# Altium footprint library Footprints.PcbLib: 320 footprints (part 5 of 20)
Each footprint in its own frame and in the unit in brackets; x right, y up, seen from the top. Pads: shape width x height; smd on the part's side, far side on the other; paste and mask are expansions set on the pad; w line width, h text height; cw(c..) or ccw(c..) is an arc to the next point about the centre after c.
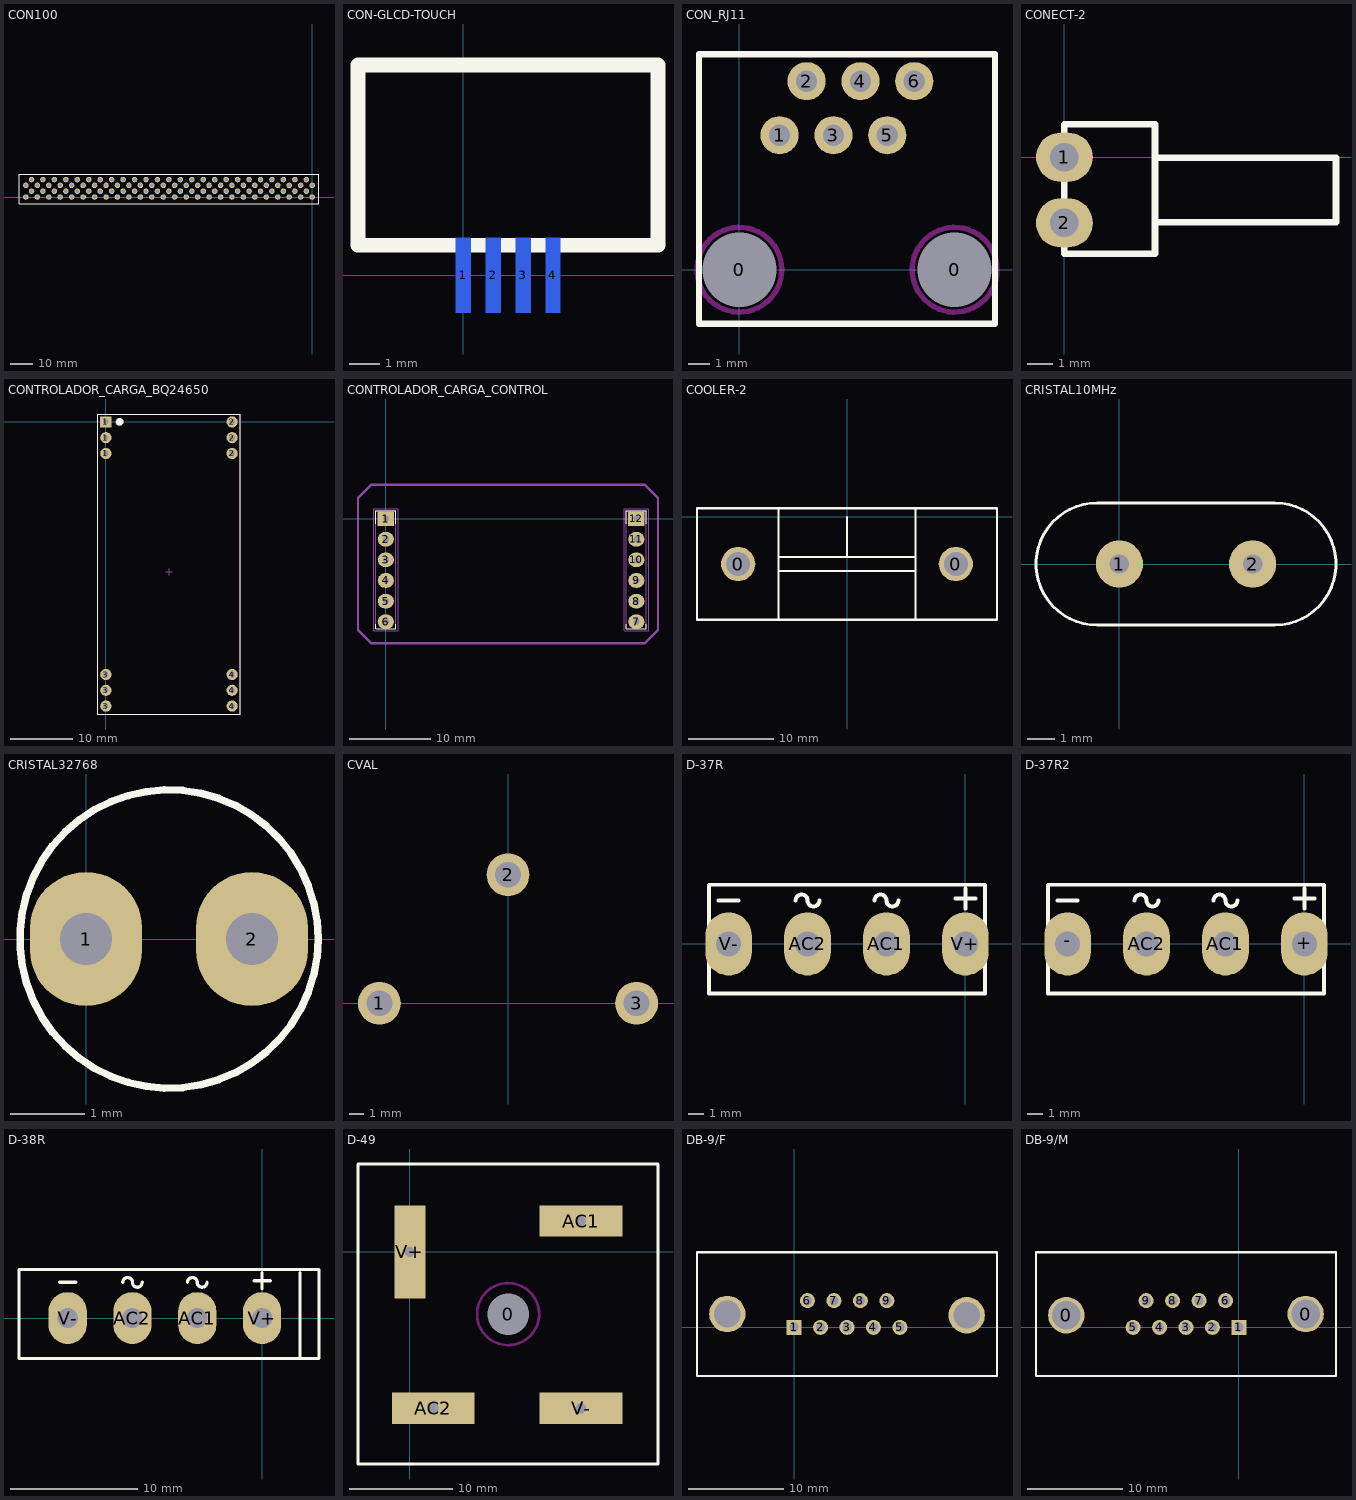
[diagram p4: the footprints below, top view; thin cyan lines are the x and y axes]

## CON100 [mm]
pads (102):
  round 2.4 hole 1.5: 1(-2.54,2.54) 1(-2.54,7.62) 1(0,0) 1(0,5.08) 2(-7.54,2.54) 2(-7.54,7.62) 2(-5,0) 2(-5,5.08) 3(-12.54,2.54) 3(-12.54,7.62) 3(-10,0) 3(-10,5.08) 4(-17.54,2.54) 4(-17.54,7.62) 4(-15,0) 4(-15,5.08) 5(-22.54,2.54) 5(-22.54,7.62) 5(-20,0) 5(-20,5.08) 6(-27.54,2.54) 6(-27.54,7.62) 6(-25,0) 6(-25,5.08) 7(-32.54,2.54) 7(-32.54,7.62) 7(-30,0) 7(-30,5.08) 8(-37.54,2.54) 8(-37.54,7.62) 8(-35,0) 8(-35,5.08) 9(-42.54,2.54) 9(-42.54,7.62) 9(-40,0) 9(-40,5.08) 10(-47.54,2.54) 10(-47.54,7.62) 10(-45,0) 10(-45,5.08) 11(-52.54,2.54) 11(-52.54,7.62) 11(-50,0) 11(-50,5.08) 12(-57.54,2.54) 12(-57.54,7.62) 12(-55,0) 12(-55,5.08) 13(-62.54,2.54) 13(-62.54,7.62) 13(-60,0) 13(-60,5.08) 14(-67.54,2.54) 14(-67.54,7.62) 14(-65,0) 14(-65,5.08) 15(-72.54,2.54) 15(-72.54,7.62) 15(-70,0) 15(-70,5.08) 16(-77.54,2.54) 16(-77.54,7.62) 16(-75,0) 16(-75,5.08) 17(-82.54,2.54) 17(-82.54,7.62) 17(-80,0) 17(-80,5.08) 18(-87.54,2.54) 18(-87.54,7.62) 18(-85,0) 18(-85,5.08) 19(-92.54,2.54) 19(-92.54,7.62) 19(-90,0) 19(-90,5.08) 20(-97.54,2.54) 20(-97.54,7.62) 20(-95,0) 20(-95,5.08) 21(-102.54,2.54) 21(-102.54,7.62) 21(-100,0) 21(-100,5.08) 22(-107.54,2.54) 22(-107.54,7.62) 22(-105,0) 22(-105,5.08) 23(-112.54,2.54) 23(-112.54,7.62) 23(-110,0) 23(-110,5.08) 24(-117.54,2.54) 24(-117.54,7.62) 24(-115,0) 24(-115,5.08) 25(-122.54,2.54) 25(-122.54,7.62) 25(-120,0) 25(-120,5.08) 26(-125,0) 26(-125,5.08)
Top Overlay:
  lines w0.254: -128,-3 -128,10 3,10 3,-3 -128,-3

## CON-GLCD-TOUCH [mm]
pads (4):
  rect 0.5x2.5 smd far side: 1(0,0) 2(1,0) 3(2,0) 4(3,0)
Top Overlay:
  lines w0.5: -3.5,1 -3.5,7 6.5,7 6.5,1 4.5,1 -3.5,1

## CON_RJ11 [mm]
pads (8):
  round 3 hole 3.5: 0(0,0) 0(10.16,0)
  round 1.8 hole 1: 1(1.9,6.35) 2(3.175,8.9) 3(4.44,6.35) 4(5.715,8.9) 5(6.98,6.35) 6(8.255,8.9)
Top Overlay:
  lines w0.305: -1.905,-2.54 -1.905,10.16 12.065,10.16 12.065,-2.54 -1.905,-2.54
Keep-Out Layer:
  circle w0.254: c10.16,0 r2
  circle w0.254: c0,0 r2

## CONECT-2 [mm]
pads (2):
  oval 2.2x1.9 hole 1.1: 1(0,0) 2(0,-2.54)
Top Overlay:
  lines w0.254: 3.5,-2.52 10.5,-2.52 10.5,-0.02 3.5,-0.02 ; 0,-3.73 3.5,-3.73 3.5,1.27 0,1.27 0,-3.73

## CONTROLADOR_CARGA_BQ24650 [mm]
pads (12):
  round 1.8 hole 0.9: 1(0,-5.08) 1(0,-2.54) 2(20.32,-5.08) 2(20.32,-2.54) 2(20.32,0) 3(0,-45.72) 3(0,-43.18) 3(0,-40.64) 4(20.32,-45.72) 4(20.32,-43.18) 4(20.32,-40.64)
  rect 1.8x1.8 hole 0.9: 1(0,0)
Top Overlay:
  circle w0.6: c2.24,0 r0.3
  lines w0.2: -1.27,-46.99 -1.27,1.27 21.59,1.27 21.59,-46.99 -1.27,-46.99
Mechanical 13:
  circle w0.1: c2.04,0 r0.5
  lines w0.1: -1.27,-46.99 -1.27,1.27 21.59,1.27 21.59,-46.99 -1.27,-46.99
Mechanical 15:
  lines w0.1: 9.66,-24.13 10.66,-24.13 ; 10.16,-24.63 10.16,-23.63
3D body: height 6.35, standoff 0, extent -1.27,-46.99 21.59,1.27

## CONTROLADOR_CARGA_CONTROL [mm]
pads (12):
  rect 2x1.8 hole 0.76 paste-2539.97: 1(0,0) 12(30.861,0)
  oval 2x1.8 hole 0.76 paste-2539.97: 2(0,-2.54) 3(0,-5.08) 4(0,-7.62) 5(0,-10.16) 6(0,-12.7) 7(30.861,-12.7) 8(30.861,-10.16) 9(30.861,-7.62) 10(30.861,-5.08) 11(30.861,-2.54)
Top Overlay:
  lines w0.12: -1.25,-13.04 -1.25,-13.57 1.25,-13.57 1.25,-13.04 ; -1.25,-0.62 -1.25,0.96 1.25,0.96 1.25,-0.62 ; 29.611,-13.04 29.611,-13.57 32.111,-13.57 32.111,-13.04 ; 29.611,-0.62 29.611,0.96 32.111,0.96 32.111,-0.62
Mechanical 1:
  lines w0.3: -3.429,-13.716 -3.429,2.54 -1.778,4.191 31.877,4.191 33.528,2.54 33.528,-13.716 31.877,-15.367 -1.778,-15.367 -3.429,-13.716
Mechanical 13:
  lines w0.001: -1.245,0.955 1.245,0.955 ; 29.616,0.955 32.106,0.955
  lines w0.12: -1.25,-13.58 -1.25,-4.12 ; -1.25,-8.5 -1.25,0.96 ; -1.244,0.96 1.25,0.96 1.25,-8.5 ; 1.25,-13.58 1.25,-4.12 ; 29.611,-13.58 29.611,-4.12 ; 29.611,-8.5 29.611,0.96 ; 29.617,0.96 32.111,0.96 32.111,-8.5 ; 32.111,-13.58 32.111,-4.12
Mechanical 15:
  circle w0.05: c0,0 r0.25
  circle w0.05: c30.861,0 r0.25
  lines w0.05: -1.5,-8.75 -1.5,1.21 1.5,1.21 1.5,-8.75 ; -1.5,-3.87 -1.5,-13.83 1.5,-13.83 1.5,-3.87 ; -0.35,0 0.35,0 ; 0,-0.35 0,0.35 ; 29.361,-8.75 29.361,1.21 32.361,1.21 32.361,-8.75 ; 29.361,-3.87 29.361,-13.83 32.361,-13.83 32.361,-3.87 ; 30.511,0 31.211,0 ; 30.861,-0.35 30.861,0.35
3D body: height 5.08, standoff 0, extent -1.31,-13.716 1.31,1.02
3D body: height 5.08, standoff 0, extent 29.551,-13.716 32.171,1.02

## COOLER-2 [mm]
pads (2):
  round 4 hole 2.8: 0(-12.7,-5.49) 0(12.7,-5.49)
Top Overlay:
  lines w0.254: -8.01,-11.96 -8,-11.95 -8,-6.29 ; -8,-5 -8,0.95 -7.99,0.96 ; 0,-4.69 0,0 ; 7.98,0.99 8,0.97 8,-6.1 ; 8,-6.15 8,-11.95 8.03,-11.98 ; -8,-6.29 -8,-4.69 8,-4.69 8,-6.29 -8,-6.29 ; -17.5,-11.99 17.5,-11.99 17.5,1.01 -17.5,1.01 -17.5,-11.99

## CRISTAL10MHz [mm]
pads (2):
  round 1.7 hole 0.7: 1(0,0) 2(4.8,0)
Top Overlay:
  lines w0.1: -0.8,-2.2 cw(c-0.807,0) -0.8,2.2 5.6,2.2 cw(c5.607,0) 5.6,-2.2 -0.8,-2.2

## CRISTAL32768 [mm]
pads (2):
  oval 1.5x1.8 hole 0.7: 1(0,0) 2(2.222,0)
Top Overlay:
  circle w0.1: c1.111,0 r2

## CVAL [mm]
pads (3):
  round 3 hole 1.8: 1(-9,0) 2(0,9) 3(9,0)

## D-37R [mm]
pads (4):
  oval 3x4.064 hole 1.6: AC1(-5.08,0) AC2(-10.16,0) V+(0,0) V-(-15.24,0)
Top Overlay:
  lines w0.254: -15.875,2.794 -14.605,2.794 ; -10.922,2.794 cw(c-10.541,2.794) -10.16,2.794 ccw(c-9.779,2.794) -9.398,2.794 ; -5.842,2.794 cw(c-5.461,2.794) -5.08,2.794 ccw(c-4.699,2.794) -4.318,2.794 ; -0.635,2.921 0.635,2.921 ; 0,2.286 0,3.556 ; -16.51,-3.175 -16.51,3.81 1.27,3.81 1.27,-3.175 -16.51,-3.175

## D-37R2 [mm]
pads (4):
  oval 3x4.064 hole 1.6: +(0,0) -(-15.24,0) AC1(-5.08,0) AC2(-10.16,0)
Top Overlay:
  lines w0.254: -15.875,2.794 -14.605,2.794 ; -10.922,2.794 cw(c-10.541,2.794) -10.16,2.794 ccw(c-9.779,2.794) -9.398,2.794 ; -5.842,2.794 cw(c-5.461,2.794) -5.08,2.794 ccw(c-4.699,2.794) -4.318,2.794 ; -0.635,2.921 0.635,2.921 ; 0,2.286 0,3.556 ; -16.51,-3.175 -16.51,3.81 1.27,3.81 1.27,-3.175 -16.51,-3.175

## D-38R [mm]
pads (4):
  oval 3x4.064 hole 1.6: AC1(-5.08,0) AC2(-10.16,0) V+(0,0) V-(-15.24,0)
Top Overlay:
  lines w0.254: -15.875,2.794 -14.605,2.794 ; -10.922,2.794 cw(c-10.541,2.794) -10.16,2.794 ccw(c-9.779,2.794) -9.398,2.794 ; -5.842,2.794 cw(c-5.461,2.794) -5.08,2.794 ccw(c-4.699,2.794) -4.318,2.794 ; -0.635,2.921 0.635,2.921 ; 0,2.286 0,3.556 ; 2.98,-3.18 2.98,3.57 ; -19.05,-3.175 4.46,-3.175 4.46,3.81 -19.05,3.81 -19.05,-3.175

## D-49 [mm]
pads (5):
  round 3.5 hole 4: 0(9.497,-6.007)
  rect 8x3 hole 1: AC1(16.55,2.99) AC2(2.27,-15.11) V-(16.55,-15.11)
  rect 3x9 hole 1: V+(0,0)
Top Overlay:
  lines w0.254: 23.99,-20.5 23.99,-20.5 ; 23.99,-20.5 -5.01,-20.5 -5.01,8.5 23.99,8.5 23.99,-20.5
Keep-Out Layer:
  circle w0.254: c9.497,-6.007 r3
Mechanical 1:
  lines w0.3: -0.63,-15.11 5.17,-15.11 ; 0,-2.9 0,2.9 ; 13.65,-15.11 19.45,-15.11 ; 13.65,2.99 19.45,2.99

## DB-9/F [mil]
pads (11):
  rect 62x62 hole 38: 1(0,0)
  round 62 hole 38: 2(109,0) 3(218,0) 4(327,0) 5(436,0) 6(55,110) 7(164,110) 8(273,110) 9(382,110)
  round 150 hole 110: ""(-275,55) ""(711,50)
Top Overlay:
  lines w8: -400,-200 836,-200 836,310
  lines w10: -400,-200 -400,310 836,310

## DB-9/M [mil]
pads (11):
  round 150 hole 118.11: 0(-711,50) 0(275,55)
  rect 62x62 hole 38: 1(0,0)
  round 62 hole 38: 2(-109,0) 3(-218,0) 4(-327,0) 5(-436,0) 6(-55,110) 7(-164,110) 8(-273,110) 9(-382,110)
Top Overlay:
  lines w8: -836,310 -836,-200 400,-200
  lines w10: -836,310 400,310 400,-200